# Altium schematic symbol library PWR763A.SCHLIB: 55 symbols (part 2 of 2)
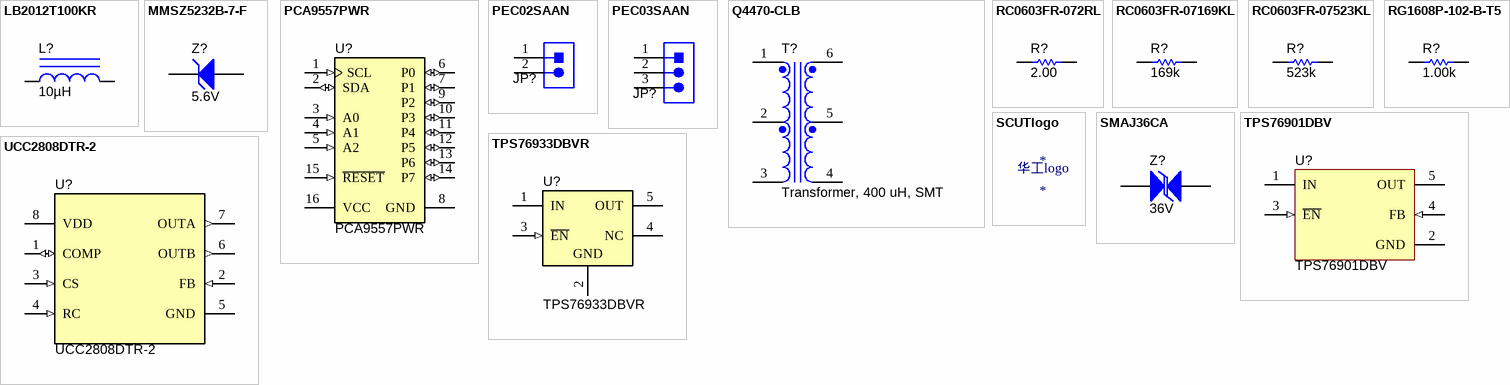
[diagram p2: symbols LB2012T100KR to UCC2808DTR-2]

## TPS76933DBVR
designator U?
Single Output LDO, 100 mA, Fixed 3.3 V Output, 2.7 to 10 V Input, with Low IQ, 5-pin SOT-23 (DBV), -40 to 125 degC, Green (RoHS & no Sb/Br); Manufacturer: Texas Instruments; Alternate PartNumber: Equivalent; Accuracy(%): 3; Fixed Output Options(V): 3.3; Iout(Max)(A): 0.1; Iq(Typ)(mA): 0.02; Rating: Catalog; SubFamily: Single Channel LDO; Vdo(Typ)(mV): 98; Vin(Max)(V): 10; Vin(Min)(V): 2.7; DatasheetVersion: SLVS203E; PackageVersion: 4073253-4/K; PackageReference: DBV0005A; PackageDescription: 5-Pin Plastic Small Outline, Body 1.60 × 2.90 mm, Pitch 0.95 mm; Supplier 1: Digi-Key; Supplier Part Number 1: 296-11039-2-ND; Supplier 2: Digi-Key; Supplier Part Number 2: 296-11039-1-ND; Supplier 3: Digi-Key; Supplier Part Number 3: 296-11039-6-ND; Supplier 4: Farnell; Supplier Part Number 4: 1535764; Supplier 5: Newark; Supplier Part Number 5: 77C1164; Supplier 6: Mouser; Supplier Part Number 6: 595-TPS76933DBVR; Eco-Plan: Green (RoHS & no Sb/Br); Vout Adj(Max)(V): 3.3; Vout Adj(Min)(V): 3.3; MountType: SMT; Code_JEDEC: MO-178; PartNumber: TPS76933DBVR; ComponentLink1Description: Manufacturer URL; ComponentLink1URL: http://www.ti.com/; ComponentLink2Description: Datasheet; ComponentLink2URL: http://www.ti.com/general/docs/lit/getliterature.tsp?genericPartNumber=TPS76933&fileType=pdf; ComponentLink3Description: Package Specification; ComponentLink3URL: http://www.ti.com/litv/pdf/mpds018i; ComponentLink4Description: URL Link1; ComponentLink4URL: Samples URL:http://www.ti.com/product/tps76933#samples; Alternate Manufacturer: Texas Instruments
footprint DBV0005A_N (SOT23, 5-Leads, Body 2.9x1.6mm, Pitch 0.95mm, IPC Medium Density)
footprint DBV0005A_L (SOT23, 5-Leads, Body 2.9x1.6mm, Pitch 0.95mm, IPC High Density)
footprint DBV0005A_M (SOT23, 5-Leads, Body 2.9x1.6mm, Pitch 0.95mm, IPC Low Density)
pins: 1 IN (power) "Input supply voltage", 2 GND (power) "Ground", 3 ~{EN} (in) "Enable input", 4 NC "No connection", 5 OUT (power) "Regulated output voltage"

## UCC2808DTR-2
designator U?
LOW POWER CURRENT MODE PUSH-PULL PWM, D0008A; Alternate PartNumber: UCC2808D-2; Manufacturer: Texas Instruments; SymbolCreator: Altium; CompType: IC; U/M: EA; SymbolVersion: 2015-08-18; PartNumber: UCC2808DTR-2; PackageReference: D0008A; MountType: SMT; ComponentLink1Description: Datasheet Link; ComponentLink1URL: http://www.ti.com/lit/ds/symlink/ucc2808-2.pdf; RoHS: Y; Publisher: Texas Instruments; LatestRevisionDate: 2015-08-19; Alternate Manufacturer: Texas Instruments
footprint D0008A_N
footprint D0008A_M
footprint D0008A_L
pins: 1 COMP (io), 2 FB (in), 3 CS (in), 4 RC (in), 5 GND (power), 6 OUTB (out), 7 OUTA (out), 8 VDD (power)